# Altium integrated library BRL3225T1R0M.IntLib: 1 symbol
Pins are listed as number, name and electrical type; pins without a type are passive.

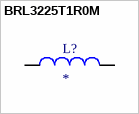
[diagram p0: symbol BRL3225T1R0M]

## BRL3225T1R0M
designator L?
1 ÂµH Semi-Shielded Drum Core, Wirewound Inductor 2.2 A 51.6mOhm Max 1210 (3225 Metric); MF: Taiyo Yuden; MP: BRL3225T1R0M; SnapEDA_Link: https://www.snapeda.com/parts/BRL3225T1R0M/Taiyo+Yuden/view-part/?ref=snap; Package: 3225 Taiyo Yuden; Value: *; Check_prices: https://www.snapeda.com/parts/BRL3225T1R0M/Taiyo+Yuden/view-part/?ref=eda
footprint INDC3225X170N
pins: 1, 2